# Altium schematic symbol library NET_TIE.SchLib: 1 symbol
Pins are listed as number, name and electrical type; pins without a type are passive.

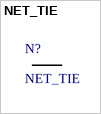
[diagram p0: symbol NET_TIE]

## NET_TIE
designator N?
footprint NET_TIE
pins: N1 NET_TIE, N2 NET_TIE